# Altium schematic symbol library 10Cnts-D.SchLib: 1 symbol
Pins are listed as number, name and electrical type; pins without a type are passive.

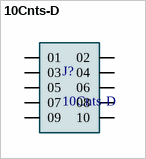
[diagram p0: symbol 10Cnts-D]

## 10Cnts-D
designator J?
MP: MTSW-105-24-T-D-290; MF: Samtec; SnapEDA_Link: https://www.snapeda.com/parts/MTSW-105-24-T-D-290/Samtec/view-part/?ref=snap; Availability: In Stock; Package: None; Check_prices: https://www.snapeda.com/parts/MTSW-105-24-T-D-290/Samtec/view-part/?ref=eda; Value: *; Purchase-URL: https://pricing.snapeda.com/search/part/MTSW-105-24-T-D-290/?ref=eda; Price: None
footprint 10Cnts-D
pins: 01, 02, 03, 04, 05, 06, 07, 08, 09, 10